# Altium schematic symbol library UCP.SchLib: 378 symbols (part 5 of 14)
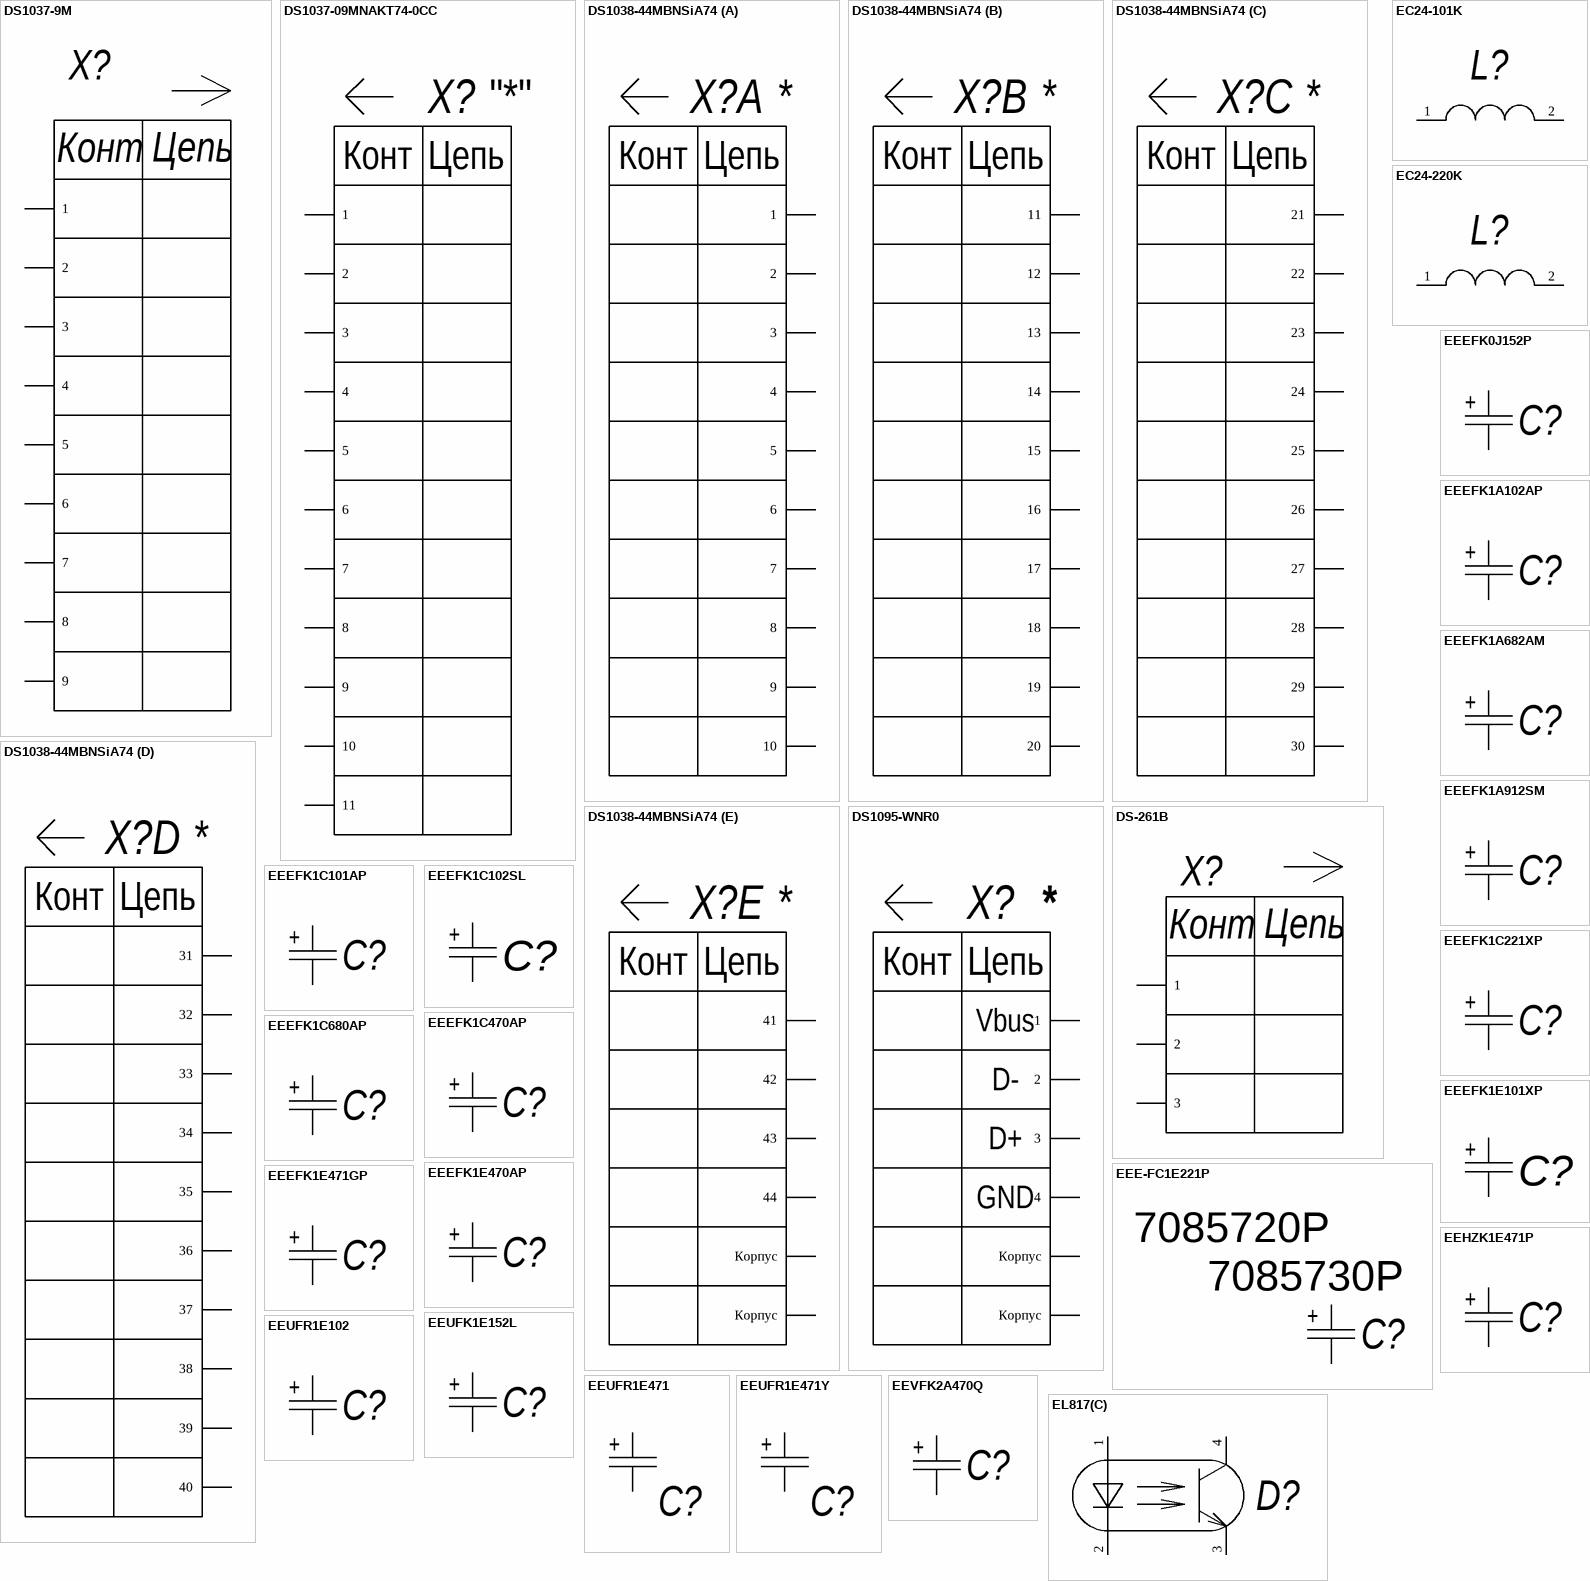
[diagram p28: symbols DS1037-9M to EL817(C)]

## EEEFK1A102AP
designator C?  (value not drawn)
Aluminium capacitor 10x10.2 1000 µF 10 V; Capacitance: 1mF; Tolerance: 20%; Ripple Current: 850mA; Voltage Rating: 10V; Impedance: 80mR; Life (Hours): 2000Hour; Leakage Current: 100uA; Dissipation Factor: 0.19%; Lead Length: 3.5mm; Value: 1mX10V; Type: Конденсатор электролитический; Supplier 1: Avnet; Supplier Part Number 1: EEE-FK1E471GP; Supplier 2: Arrow Electronics; Manufacturer 2: Panasonic; Manufacturer Part Number 2: EEE-FK1A102AP; RoHS: Yes; Category: Aluminum Electrolytic Capacitors; Stock 2: 4; Pricing 2: 1=0,75620, 500=0,34460 (USD); Mount: SMT; Case/Package: 10x10,2 (SMD-2); Number of Pins: 2; Contact Plating: Tin; Dielectric Material: Aluminium; Min Operating Temperature: -55°C; Max Operating Temperature: 105°C; Packaging: Tape and Reel; Voltage Rating (DC): 10V; Package Quantity: 500; Ripple Current (AC): 850mA; ESR (Equivalent Series Resistance): 80mR; Termination: SMD/SMT; Voltage: 10V; Series: FK; Construction: Cylindrical; Diameter: 10mm; Length: 10.2mm; Width: 10.3mm; Height: 10.2mm; Height - Seated (Max): 0.402inch; Lead Pitch: 4.6mm; Radiation Hardening: No; Lead Free: Lead Free; REACH SVHC: Unknown; RoHS Compliant: Yes; ComponentLink1URL: https://datasheet.ciiva.com/11783/0900766b80bed286-11783449.pdf?src-supplier=RSComponents; ComponentLink1Description: https://datasheet.ciiva.com/11783/0900766b80bed286-11783449.pdf?src-supplier=RSComponents; ComponentLink2URL: https://datasheet.ciiva.com/43454/58258-43454698.pdf?src-supplier=Farnell; ComponentLink2Description: https://datasheet.ciiva.com/43454/58258-43454698.pdf?src-supplier=Farnell; ComponentLink3URL: https://datasheet.ciiva.com/46388/58258-46388200.pdf?src-supplier=Element14; ComponentLink3Description: https://datasheet.ciiva.com/46388/58258-46388200.pdf?src-supplier=Element14; ComponentLink4URL: https://datasheet.ciiva.com/24024/aba0000ce120-24024165.pdf?src-supplier=Mouser; ComponentLink4Description: https://datasheet.ciiva.com/24024/aba0000ce120-24024165.pdf?src-supplier=Mouser; ComponentLink5URL: https://datasheet.ciiva.com/14602/70068081-14602683.pdf?src-supplier=Allied+Electronics; ComponentLink5Description: https://datasheet.ciiva.com/14602/70068081-14602683.pdf?src-supplier=Allied+Electronics; ComponentLink6URL: https://datasheet.ciiva.com/14607/70068081-14607445.pdf?src-supplier=Allied+Electronics; ComponentLink6Description: https://datasheet.ciiva.com/14607/70068081-14607445.pdf?src-supplier=Allied+Electronics; ComponentLink7URL: https://datasheet.ciiva.com/2985/aba0000ce119-2985368.pdf?src-supplier=Avnet; ComponentLink7Description: https://datasheet.ciiva.com/2985/aba0000ce119-2985368.pdf?src-supplier=Avnet; ComponentLink8URL: https://datasheet.ciiva.com/2985/aba0000ce119-2985367.pdf?src-supplier=Avnet; ComponentLink8Description: https://datasheet.ciiva.com/2985/aba0000ce119-2985367.pdf?src-supplier=Avnet; Case Code (Metric): 10x10.2
footprint CAPAE1030X1050L320X90N (Capacitor, Aluminum Electrolytic; 10.30 mm L X 10.30 mm W X 10.50 mm H body)
pins: 1, 2
text: +

## EEEFK1A682AM
designator C?, comment EEEFK1A682A  (value not drawn)
Aluminium capacitor 18x16.5 6800 µF 10 V; Capacitance: 6.8mF; Tolerance: 20%; Ripple Current: 2.06A; Voltage Rating: 10V; Impedance: 33mR; Life (Hours): 5000Hour; Dissipation Factor: 0.29%; Polarity: Polar; Value: 6.8mX10V; Type: Конденсатор электролитический; Supplier 1: Avnet; Supplier Part Number 1: EEE-FK1E471GP; Supplier 2: Digi-Key; Manufacturer 2: Panasonic; Manufacturer Part Number 2: EEE-FK1A682AM; RoHS: Yes; Category: Aluminum Electrolytic Capacitors; Stock 2: 400; Pricing 2: 1=2,62000, 10=2,11500, 50=1,84580 (USD); Mount: SMT; Case/Package: 18x16,5 (SMD-2); Min Operating Temperature: -55°C; Max Operating Temperature: 105°C; Packaging: Tape and Reel; Package Quantity: 125; Voltage Rating (DC): 10V; ESR (Equivalent Series Resistance): 33mR; Termination: SMD/SMT; Voltage: 10V; Series: Automotive, AEC-Q200, FK; Construction: Cylindrical; Diameter: 18mm; Length: 16.5mm; Height: 21mm; Height - Seated (Max): 0.669inch; RoHS Compliant: Yes; ComponentLink1URL: https://datasheet.ciiva.com/11783/0900766b80e4e801-11783560.pdf?src-supplier=RSComponents; ComponentLink1Description: https://datasheet.ciiva.com/11783/0900766b80e4e801-11783560.pdf?src-supplier=RSComponents; ComponentLink2URL: https://datasheet.ciiva.com/24234/aba0000ce88-470570-24234639.pdf?src-supplier=Mouser; ComponentLink2Description: https://datasheet.ciiva.com/24234/aba0000ce88-470570-24234639.pdf?src-supplier=Mouser; Case Code (Metric): 18x16.5
pins: 1, 2
text: +

## EEEFK1A912SM
designator C?  (value not drawn)
Aluminium capacitor 18x21.5 9100 µF 10 V; Manufacturer 1: Panasonic; Manufacturer Part Number 1: EEE-FK1A912SM; Capacitance: 9.1mF; Voltage Rating (DC): 10V; Value: 9.1mX10V; Type: Конденсатор электролитический; ComponentLink1URL: https://datasheet.ciiva.com/11783/0900766b80e4e801-11783560.pdf?src-supplier=RSComponents; ComponentLink1Description: https://datasheet.ciiva.com/11783/0900766b80e4e801-11783560.pdf?src-supplier=RSComponents; ComponentLink2URL: https://datasheet.ciiva.com/24234/aba0000ce88-470570-24234639.pdf?src-supplier=Mouser; ComponentLink2Description: https://datasheet.ciiva.com/24234/aba0000ce88-470570-24234639.pdf?src-supplier=Mouser; ComponentLink3URL: https://industrial.panasonic.com/cdbs/www-data/pdf/RDE0000/ABA0000C1247.pdf?src-supplier=Digi-Key; ComponentLink3Description: https://industrial.panasonic.com/cdbs/www-data/pdf/RDE0000/ABA0000C1247.pdf?src-supplier=Digi-Key; Supplier 1: Digi-Key; RoHS: No; Category: Aluminum Electrolytic Capacitors; Stock 1: 383; Pricing 1: 1=3,78000, 10=3,06100 (USD); Supplier 2: Digi-Key; Manufacturer 2: Panasonic; Manufacturer Part Number 2: EEE-FK1A912SV; Stock 2: 230; Pricing 2: 1=3,96000, 10=3,19200 (USD); Case Code (Metric): 18x21.5; Voltage Rating: 10V; Voltage: 10V; Case/Package: 18x21,5 (SMD-2); Mount: SMT
footprint CAPAE1900X2200L670X120 (Aluminum Electrolytic Capacitor, Body 19,00x19,00x21,00mm, IPC Medium Density)
pins: 1, 2
text: +

## EEEFK1C101AP
designator C?  (value not drawn)
Aluminium capacitor 6.3x6.1 100 µF x 16 V; Capacitance: 100uF; Voltage Rating (DC): 16V; Value: 100uX16V; Type: Конденсатор электролитический; Supplier 1: Avnet; Supplier Part Number 1: EEE-FK1E471GP; Case Code (Metric): 6.3x6.1; Voltage Rating: 16V; Voltage: 16V; Case/Package: 6,3x5,8 (SMD-2); Mount: SMT
footprint CAPAE660X610L260X65N (Capacitor, Aluminum Electrolytic; 6.60 mm L X 6.60 mm W X 6.10 mm H body)
pins: 1, 2
text: +

## EEEFK1C102SL
designator C?  (value not drawn)
Cap Aluminum 1000uF 16V 20% (10 X 10.2mm) Cylindrical 0.08 Ohm 850mA 2000 hr 105°C Embossed T/R; Manufacturer 1: Panasonic; Manufacturer Part Number 1: EEEFK1C102SP; Capacitance: 1mF; ESR (Equivalent Series Resistance): 80mR; Polarity: Polar; Ripple Current: 552.5mA; Life (Hours): 2000Hour; Value: 1mX16V; Type: Конденсатор электролитический; Supplier 1: RSComponents; RoHS: Yes; Category: Aluminum Electrolytic Capacitors; Stock 1: 1; Pricing 1: 10=0,79200, 100=0,57300 (USD); Mount: SMT; Case/Package: 10x10,2 (SMD-2); Min Operating Temperature: -55°C; Max Operating Temperature: 105°C; Package Quantity: 500; Packaging: Cut Tape; Voltage Rating: 16V; Ripple Current (AC): 850mA; Tolerance: 20%; Voltage Rating (DC): 16V; Diameter: 10mm; Height: 10.2mm; Height - Seated (Max): 0.413inch; REACH SVHC: Unknown; RoHS Compliant: Yes; ComponentLink1URL: http://www.farnell.com/datasheets/2052494.pdf?src-supplier=Farnell; ComponentLink1Description: http://www.farnell.com/datasheets/2052494.pdf?src-supplier=Farnell; ComponentLink2URL: http://www.farnell.com/datasheets/2813662.pdf?src-supplier=Farnell; ComponentLink2Description: http://www.farnell.com/datasheets/2813662.pdf?src-supplier=Farnell; ComponentLink3URL: https://media.digikey.com/pdf/Data%20Sheets/Panasonic%20Capacitors%20PDFs/FKS-V_Series_NPI.pdf?src-supplier=Digi-Key; ComponentLink3Description: https://media.digikey.com/pdf/Data%20Sheets/Panasonic%20Capacitors%20PDFs/FKS-V_Series_NPI.pdf?src-supplier=Digi-Key; ComponentLink4URL: http://www.farnell.com/datasheets/1996420.pdf?src-supplier=Element14; ComponentLink4Description: http://www.farnell.com/datasheets/1996420.pdf?src-supplier=Element14; ComponentLink5URL: https://industrial.panasonic.com/cdbs/www-data/pdf/RDE0000/DME0000COL90.pdf?src-supplier=Digi-Key; ComponentLink5Description: https://industrial.panasonic.com/cdbs/www-data/pdf/RDE0000/DME0000COL90.pdf?src-supplier=Digi-Key; Case Code (Metric): 10x10.2; Voltage: 16V
footprint CAPAE1030X1050L320X90N (Capacitor, Aluminum Electrolytic; 10.30 mm L X 10.30 mm W X 10.50 mm H body)
pins: 1, 2
text: +

## EEEFK1C221XP
designator C?  (value not drawn)
Aluminium capacitor 6.3x7.7 220 µF x 16 V; Capacitance: 220uF; Voltage Rating (DC): 16V; Value: 220uX16V; Type: Конденсатор электролитический; Case Code (Metric): 6.3x7.7; Voltage Rating: 16V; Voltage: 16V; Case/Package: 6,3x7,7 (SMD-2); Mount: SMT; Supplier 1: Avnet; Supplier Part Number 1: 23T0845
footprint CAPAE660X610L260X65N (Capacitor, Aluminum Electrolytic; 6.60 mm L X 6.60 mm W X 6.10 mm H body)
pins: 1, 2
text: +

## EEEFK1C470AP
designator C?  (value not drawn)
Aluminium capacitor 6.3x6.1 47 µF x 16 V; Capacitance: 47uF; Voltage Rating (DC): 16V; Value: 47uX16V; Type: Конденсатор электролитический; Supplier 1: Avnet; Supplier Part Number 1: EEE-FK1E471GP; Case Code (Metric): 6.3x6.1; Voltage Rating: 16V; Voltage: 16V; Case/Package: 6,3x5,8 (SMD-2); Mount: SMT
footprint CAPAE660X610L260X65N (Capacitor, Aluminum Electrolytic; 6.60 mm L X 6.60 mm W X 6.10 mm H body)
pins: 1, 2
text: +

## EEEFK1C680AP
designator C?  (value not drawn)
Aluminium capacitor 6.3x6.1 68 µF x 16 V; Capacitance: 68uF; Voltage Rating (DC): 16V; Value: 68uX16V; Type: Конденсатор электролитический; Supplier 1: Avnet; Supplier Part Number 1: EEE-FK1E471GP; Case Code (Metric): 6.3x6.1; Voltage Rating: 16V; Voltage: 16V; Case/Package: 6,3x5,8 (SMD-2); Mount: SMT
footprint CAPAE660X610L260X65N (Capacitor, Aluminum Electrolytic; 6.60 mm L X 6.60 mm W X 6.10 mm H body)
pins: 1, 2
text: +

## EEEFK1E101XP
designator C?  (value not drawn)
Capacitor; Aluminum Electrolytic; Ecap 100uF 25V D8 Case FK SMT; Manufacturer 1: Panasonic; Manufacturer Part Number 1: EEE-FK1E101XP; Tolerance: 20%; Ripple Current: 280mA; Life (Hours): 2000Hour; ESR (Equivalent Series Resistance): 340mR; Polarity: Polar; Leakage Current: 25uA; Lead Diameter: 0.65mm; Value: 100uX25V; Type: Конденсатор электролитический; Supplier 1: RSComponents; Supplier Part Number 1: 7083428; RoHS: Yes; Category: Aluminum Electrolytic Capacitors; Stock 1: 1; Pricing 1: 25=0,58000, 100=0,53900, 250=0,50900, 500=0,46900, 1000=0,43200 (USD); Mount: SMT; Case/Package: 6,3x5,8 (SMD-2); Number of Pins: 8; Contact Plating: Tin; Min Operating Temperature: -55°C; Max Operating Temperature: 105°C; Capacitance: 100uF; Voltage Rating (DC): 25V; Packaging: Tape and Reel; Voltage Rating: 25V; Ripple Current (AC): 280mA; Impedance: 340mR; Package Quantity: 1; Termination: SMD/SMT; Voltage: 25V; Series: FK; Construction: Cylindrical; Diameter: 6.3mm; Length: 7.7mm; Width: 7.8mm; Height: 7.7mm; Lead Pitch: 1.8mm; Height - Seated (Max): 0.315inch; Radiation Hardening: No; REACH SVHC: No SVHC; Lead Free: Lead Free; RoHS Compliant: Yes; ComponentLink1URL: https://datasheet.ciiva.com/11777/0900766b80e4e8b0-11777232.pdf?src-supplier=RSComponents; ComponentLink1Description: https://datasheet.ciiva.com/11777/0900766b80e4e8b0-11777232.pdf?src-supplier=RSComponents; ComponentLink2URL: https://datasheet.ciiva.com/46386/1676921-46386184.pdf?src-supplier=Element14; ComponentLink2Description: https://datasheet.ciiva.com/46386/1676921-46386184.pdf?src-supplier=Element14; ComponentLink3URL: https://datasheet.ciiva.com/46376/1676921-46376486.pdf?src-supplier=Element14; ComponentLink3Description: https://datasheet.ciiva.com/46376/1676921-46376486.pdf?src-supplier=Element14; ComponentLink4URL: https://datasheet.ciiva.com/43463/58258-43463513.pdf?src-supplier=Farnell; ComponentLink4Description: https://datasheet.ciiva.com/43463/58258-43463513.pdf?src-supplier=Farnell; ComponentLink5URL: https://datasheet.ciiva.com/46386/58258-46386183.pdf?src-supplier=Element14; ComponentLink5Description: https://datasheet.ciiva.com/46386/58258-46386183.pdf?src-supplier=Element14; ComponentLink6URL: https://datasheet.ciiva.com/28678/731857-28678871.pdf?src-supplier=Element14; ComponentLink6Description: https://datasheet.ciiva.com/28678/731857-28678871.pdf?src-supplier=Element14; ComponentLink7URL: https://datasheet.ciiva.com/24023/aba0000ce120-24023434.pdf?src-supplier=Mouser; ComponentLink7Description: https://datasheet.ciiva.com/24023/aba0000ce120-24023434.pdf?src-supplier=Mouser; ComponentLink8URL: https://datasheet.ciiva.com/14594/70258115-14594399.pdf?src-supplier=Allied+Electronics; ComponentLink8Description: https://datasheet.ciiva.com/14594/70258115-14594399.pdf?src-supplier=Allied+Electronics; ComponentLink9URL: https://datasheet.ciiva.com/2983/aba0000ce120-2983950.pdf?src-supplier=Avnet; ComponentLink9Description: https://datasheet.ciiva.com/2983/aba0000ce120-2983950.pdf?src-supplier=Avnet; ComponentLink10URL: https://datasheet.ciiva.com/16449/aba0000ce120-16449109.pdf?src-supplier=Future+Electronics; ComponentLink10Description: https://datasheet.ciiva.com/16449/aba0000ce120-16449109.pdf?src-supplier=Future+Electronics; ComponentLink11URL: https://datasheet.ciiva.com/2983/aba0000ce120-2983949.pdf?src-supplier=Avnet; ComponentLink11Description: https://datasheet.ciiva.com/2983/aba0000ce120-2983949.pdf?src-supplier=Avnet; Case Code (Metric): 6.3x6.1
footprint CAPAE660X610L260X65N (Capacitor, Aluminum Electrolytic; 6.60 mm L X 6.60 mm W X 6.10 mm H body)
pins: 1, 2
text: +

## EEEFK1E470AP
designator C?  (value not drawn)
Aluminium capacitor 6.3x6.1 47 µF x 25 V; Manufacturer 1: Panasonic; Manufacturer Part Number 1: EEE-FK1E470AP; Description 1: Cap Aluminum 47uF 25V 20% (6.3 X 5.8mm) SMD 240mA 2000 hr 105°C T/R; Capacitance: 47uF; Tolerance: 20%; Ripple Current: 240mA; Voltage Rating: 25V; Impedance: 360mR; Polarity: Polar; Life (Hours): 2000Hour; Leakage Current: 11.7uA; Lead Length: 2.6mm; Value: 47uX25V; Type: Конденсатор электролитический; Supplier 1: Arrow Electronics; Supplier Part Number 1: EEE-FK1E470AP; RoHS: Yes; Category: Aluminum Electrolytic Capacitors; Stock 1: 2; Pricing 1: 1=0,36020, 1000=0,14660 (USD); Mount: SMT; Case/Package: 6,3x5,8 (SMD-2); Number of Pins: 2; Contact Plating: Tin; Dielectric Material: Aluminium; Min Operating Temperature: -55°C; Max Operating Temperature: 105°C; Packaging: Tape and Reel; Package Quantity: 1000; Ripple Current (AC): 240mA; Voltage Rating (DC): 25V; ESR (Equivalent Series Resistance): 360mR; Termination: SMD/SMT; Voltage: 25V; Series: FK; Construction: Cylindrical; Diameter: 6.3mm; Length: 5.8mm; Width: 6.6mm; Height: 5.8mm; Height - Seated (Max): 0.24inch; Lead Pitch: 1.8mm; Radiation Hardening: No; REACH SVHC: Unknown; Lead Free: Lead Free; RoHS Compliant: Yes; ComponentLink1URL: https://datasheet.ciiva.com/11783/0900766b80bed286-11783530.pdf?src-supplier=RSComponents; ComponentLink1Description: https://datasheet.ciiva.com/11783/0900766b80bed286-11783530.pdf?src-supplier=RSComponents; ComponentLink2URL: https://datasheet.ciiva.com/46388/58258-46388550.pdf?src-supplier=Element14; ComponentLink2Description: https://datasheet.ciiva.com/46388/58258-46388550.pdf?src-supplier=Element14; ComponentLink3URL: https://datasheet.ciiva.com/5949/58258-5949726.pdf?src-supplier=Farnell; ComponentLink3Description: https://datasheet.ciiva.com/5949/58258-5949726.pdf?src-supplier=Farnell; ComponentLink4URL: https://datasheet.ciiva.com/48524/eeefk-high-temp-eng-tds-48524060.pdf?src-supplier=Distrelec; ComponentLink4Description: https://datasheet.ciiva.com/48524/eeefk-high-temp-eng-tds-48524060.pdf?src-supplier=Distrelec; ComponentLink5URL: https://datasheet.ciiva.com/28678/58258-28678894.pdf?src-supplier=Element14; ComponentLink5Description: https://datasheet.ciiva.com/28678/58258-28678894.pdf?src-supplier=Element14; ComponentLink6URL: https://datasheet.ciiva.com/14595/70068081-14595769.pdf?src-supplier=Allied+Electronics; ComponentLink6Description: https://datasheet.ciiva.com/14595/70068081-14595769.pdf?src-supplier=Allied+Electronics; ComponentLink7URL: https://datasheet.ciiva.com/2985/aba0000ce119-2985429.pdf?src-supplier=Avnet; ComponentLink7Description: https://datasheet.ciiva.com/2985/aba0000ce119-2985429.pdf?src-supplier=Avnet; ComponentLink8URL: https://datasheet.ciiva.com/2985/aba0000ce119-2985428.pdf?src-supplier=Avnet; ComponentLink8Description: https://datasheet.ciiva.com/2985/aba0000ce119-2985428.pdf?src-supplier=Avnet; ComponentLink9URL: https://datasheet.ciiva.com/30206/48aba0000ce119-30206286.pdf?src-supplier=Onlinecomponents.com; ComponentLink9Description: https://datasheet.ciiva.com/30206/48aba0000ce119-30206286.pdf?src-supplier=Onlinecomponents.com; ComponentLink10URL: https://datasheet.ciiva.com/17356/aba0000ce119-17356191.pdf?src-supplier=Avnet+Europe; ComponentLink10Description: https://datasheet.ciiva.com/17356/aba0000ce119-17356191.pdf?src-supplier=Avnet+Europe; Case Code (Metric): 6.3x6.1
footprint CAPAE660X610L260X65N (Capacitor, Aluminum Electrolytic; 6.60 mm L X 6.60 mm W X 6.10 mm H body)
pins: 1, 2
text: +

## EEEFK1E471GP
designator C?  (value not drawn)
Aluminium capacitor 10x10.2 470 µF; Capacitance: 470uF; Voltage Rating: 25V; Tolerance: 20%; Ripple Current: 850mA; Polarity: Polar; Life (Hours): 5000Hour; Leakage Current: 3uA; Dissipation Factor: 0.14%; Impedance: 80mR; Value: 470uX25V; Type: Конденсатор электролитический; Supplier 1: Avnet; Supplier Part Number 1: EEE-FK1E471GP; Supplier 2: RSComponents; Supplier Part Number 2: 7271026P; Manufacturer 2: Panasonic; Manufacturer Part Number 2: EEE-FK1E471GP; RoHS: Yes; Category: Aluminum Electrolytic Capacitors; Stock 2: 1; Pricing 2: 5=1,03500, 50=0,60700, 250=0,53100, 500=0,41500 (USD); Mount: SMT; Case/Package: 10x10,2 (SMD-2); Contact Plating: Tin; Min Operating Temperature: -55°C; Max Operating Temperature: 125°C; Packaging: Tape and Reel; Package Quantity: 500; Ripple Current (AC): 850mA; Voltage Rating (DC): 25V; Termination: SMD/SMT; Voltage: 25V; Series: FK; Construction: Cylindrical; ESR (Equivalent Series Resistance): 80mR; Diameter: 10mm; Length: 10.2mm; Width: 12mm; Height: 10.2mm; Height - Seated (Max): 0.413inch; Radiation Hardening: No; REACH SVHC: No SVHC; Lead Free: Lead Free; RoHS Compliant: Yes; ComponentLink1URL: https://datasheet.ciiva.com/11781/0900766b80e4e8b0-11781152.pdf?src-supplier=RSComponents; ComponentLink1Description: https://datasheet.ciiva.com/11781/0900766b80e4e8b0-11781152.pdf?src-supplier=RSComponents; ComponentLink2URL: https://datasheet.ciiva.com/46378/1676921-46378360.pdf?src-supplier=Element14; ComponentLink2Description: https://datasheet.ciiva.com/46378/1676921-46378360.pdf?src-supplier=Element14; ComponentLink3URL: https://datasheet.ciiva.com/31418/1676921-31418314.pdf?src-supplier=Farnell; ComponentLink3Description: https://datasheet.ciiva.com/31418/1676921-31418314.pdf?src-supplier=Farnell; ComponentLink4URL: https://datasheet.ciiva.com/24072/aba0000ce120-24072111.pdf?src-supplier=Mouser; ComponentLink4Description: https://datasheet.ciiva.com/24072/aba0000ce120-24072111.pdf?src-supplier=Mouser; ComponentLink5URL: https://datasheet.ciiva.com/14603/70258115-14603257.pdf?src-supplier=Allied+Electronics; ComponentLink5Description: https://datasheet.ciiva.com/14603/70258115-14603257.pdf?src-supplier=Allied+Electronics; ComponentLink6URL: https://datasheet.ciiva.com/14604/70258115-14604159.pdf?src-supplier=Allied+Electronics; ComponentLink6Description: https://datasheet.ciiva.com/14604/70258115-14604159.pdf?src-supplier=Allied+Electronics; ComponentLink7URL: https://datasheet.ciiva.com/2983/aba0000ce120-2983959.pdf?src-supplier=Avnet; ComponentLink7Description: https://datasheet.ciiva.com/2983/aba0000ce120-2983959.pdf?src-supplier=Avnet; ComponentLink8URL: https://datasheet.ciiva.com/16432/aba0000ce120-16432908.pdf?src-supplier=Future+Electronics; ComponentLink8Description: https://datasheet.ciiva.com/16432/aba0000ce120-16432908.pdf?src-supplier=Future+Electronics; ComponentLink9URL: https://datasheet.ciiva.com/15166/getdatasheetpartid-191535-15166316.pdf?src-supplier=Verical; ComponentLink9Description: https://datasheet.ciiva.com/15166/getdatasheetpartid-191535-15166316.pdf?src-supplier=Verical; ComponentLink10URL: https://datasheet.ciiva.com/2985/aba0000ce120-2985432.pdf?src-supplier=Avnet; ComponentLink10Description: https://datasheet.ciiva.com/2985/aba0000ce120-2985432.pdf?src-supplier=Avnet; ComponentLink11URL: https://datasheet.ciiva.com/30249/aba0000ce120-30249069.pdf?src-supplier=Onlinecomponents.com; ComponentLink11Description: https://datasheet.ciiva.com/30249/aba0000ce120-30249069.pdf?src-supplier=Onlinecomponents.com; Case Code (Metric): 10x10.2
footprint CAPAE1030X1050L320X90N (Capacitor, Aluminum Electrolytic; 10.30 mm L X 10.30 mm W X 10.50 mm H body)
pins: 1, 2
text: +

## EEHZK1E471P
designator C?  (value not drawn)
Aluminium capacitor 10x10.2 470 µF 25V Irms 2800 mA; Manufacturer 1: Panasonic; Value: 470uX25V; Type: Конденсатор электролитический; Capacitance: 470uF; Tolerance: 20%; ESR (Equivalent Series Resistance): 20mR; Life (Hours): 4000Hour; Mount: SMT; Case/Package: 10x10,2 (SMD-2); Termination: SMD/SMT; Case Code (Metric): 10x10.2; Voltage: 25V; Voltage Rating (DC): 25V; Voltage Rating: 25V; Supplier 1: Rs; Supplier Part Number 1: 1311958P; Manufacturer Part Number 1: EEHZK1E471P; RoHS 1: Yes; Category: Polymer Capacitors; Stock 1: 890; Pricing 1: 25=2,234, 50=2,07, 125=1,928, 250=1,738 (GBP); Min Operating Temperature: -55°C; Max Operating Temperature: 125°C; Packaging: Cut Tape; Resistor Type: Hybrid; Ratings: AEC-Q200; RoHS Compliant: Yes; ComponentLink1URL: http://industrial.panasonic.com/cdbs/www-data/pdf/RDD0000/ABA0000C1229.pdf?src-supplier=Farnell; ComponentLink1Description: http://industrial.panasonic.com/cdbs/www-data/pdf/RDD0000/ABA0000C1229.pdf?src-supplier=Farnell; ComponentLink2URL: https://industrial.panasonic.com/cdbs/www-data/pdf/RDD0000/DMD0000COL81.pdf?src-supplier=Digi-Key; ComponentLink2Description: https://industrial.panasonic.com/cdbs/www-data/pdf/RDD0000/DMD0000COL81.pdf?src-supplier=Digi-Key; ComponentLink3URL: https://industrial.panasonic.com/cdbs/www-data/pdf/RDD0000/ABA0000C1229.pdf?src-supplier=Digi-Key; ComponentLink3Description: https://industrial.panasonic.com/cdbs/www-data/pdf/RDD0000/ABA0000C1229.pdf?src-supplier=Digi-Key
footprint CAPAE1030X1050L320X90N (Capacitor, Aluminum Electrolytic; 10.30 mm L X 10.30 mm W X 10.50 mm H body)
pins: 1, 2
text: +

## EEUFK1E152L
designator C?  (value not drawn)
Cap Aluminum 1500uF 25V 20% (10 X 30mm) Radial 5mm 2140mA 4000 hr 105C Bulk; Manufacturer 1: Panasonic; Dielectric Material: Aluminium; Capacitance: 1.5mF; Ripple Current: 2.14A; Life (Hours): 4000Hour; Dissipation Factor: 0.14%; Lead/Base Style: Straight; Lead Diameter: 0.6mm; Value: 1.5mX25V; Type: Конденсатор электролитический; Supplier 1: Digi-Key; Manufacturer Part Number 1: EEUFK1E152L; RoHS: Yes; Category: Aluminum Electrolytic Capacitors; Stock 1: 223; Pricing 1: 1=1,47000, 10=1,15800, 50=1,00380, 100=0,86860, 500=0,65630, 1000=0,57908, 2500=0,54048, 5000=0,52117 (USD); Mount: THT; Case/Package: DIP-5; Min Operating Temperature: -55°C; Max Operating Temperature: 105°C; Tolerance: 20%; Termination: Radial; Voltage Rating: 25V; Packaging: Bulk; Voltage: 25V; Voltage Rating (DC): 25V; Package Quantity: 100; Series: FK; Construction: RADIAL; Diameter: 10mm; Length: 30mm; Height: 30mm; Lead Pitch: 5mm; Radiation Hardening: No; REACH SVHC: No SVHC; RoHS Compliant: Yes; ComponentLink1URL: https://datasheet.ciiva.com/11780/0900766b80bee888-11780167.pdf?src-supplier=RSComponents; ComponentLink1Description: https://datasheet.ciiva.com/11780/0900766b80bee888-11780167.pdf?src-supplier=RSComponents; ComponentLink2URL: https://datasheet.ciiva.com/6060/425742-6060252.pdf?src-supplier=Farnell; ComponentLink2Description: https://datasheet.ciiva.com/6060/425742-6060252.pdf?src-supplier=Farnell; ComponentLink3URL: https://datasheet.ciiva.com/7903/425742-7903046.pdf?src-supplier=Element14; ComponentLink3Description: https://datasheet.ciiva.com/7903/425742-7903046.pdf?src-supplier=Element14; ComponentLink4URL: https://datasheet.ciiva.com/11677/aba0000ce89-11677785.pdf?src-supplier=Avnet; ComponentLink4Description: https://datasheet.ciiva.com/11677/aba0000ce89-11677785.pdf?src-supplier=Avnet; ComponentLink5URL: https://datasheet.ciiva.com/17531/aba0000ce89-17531930.pdf?src-supplier=Avnet+Europe; ComponentLink5Description: https://datasheet.ciiva.com/17531/aba0000ce89-17531930.pdf?src-supplier=Avnet+Europe; Supplier Part Number 1: P124293-ND; Case Code (Metric): 10x30
footprint CAPPRD500W62D1050H3000_HU (Capacitor, Polarized, Radial (Electrolytic); 5.00 mm C X 10.00 mm Dia X 30.00 mm H body)
footprint CAPPRD500W62D1050H3000_HD (Capacitor, Polarized, Radial (Electrolytic); 5.00 mm C X 10.00 mm Dia X 30.00 mm H body)
pins: 1, 2
text: +

## EEUFR1E102
designator C?  (value not drawn)
Aluminium capacitor 10x20 1000 µF 25V; Capacitance: 1mF; Value: 1mX25; Type: Конденсатор электролитический; Supplier 1: Digi-Key; Supplier Part Number 1: P14424-ND; Case Code (Metric): 10x20; Voltage Rating (DC): 25V; Voltage Rating: 25V; Voltage: 25V; Case/Package: DIP-4; Mount: THT
footprint CAPPRD500W60D1050H2200 (Capacitor, Polarized, Radial (Electrolytic); 5.00 mm C X 10.50 mm Dia X 22.00 mm H body)
footprint CAPPRD500W60D1050H1100 _HU (Capacitor, Polarized, Radial (Electrolytic); 5.00 mm C X 10.50 mm Dia X 22.00 mm H body)
footprint CAPPRD500W60D1050H1100 _HD (Capacitor, Polarized, Radial (Electrolytic); 5.00 mm C X 10.50 mm Dia X 22.00 mm H body)
pins: 1, 2
text: +

## EEUFR1E471
designator C?  (value not drawn)
Aluminium capacitor 10x12,5 470 µF 25V; Capacitance: 470uF; Value: 470uX25V; Type: Конденсатор электролитический; Supplier 1: Digi-Key; Supplier Part Number 1: P14419-ND; Case Code (Metric): 10x12.5; Voltage Rating (DC): 25V; Voltage Rating: 25V; Voltage: 25V; Case/Package: DIP-3; Mount: THT
footprint CAPPRD500W60D1050H1400 (Capacitor, Polarized, Radial (Electrolytic); 5.00 mm C X 10.50 mm Dia X 14.00 mm H body)
pins: 1, 2
text: +

## EEUFR1E471Y
designator C?  (value not drawn)
Aluminium capacitor 10x15 470 µF 25V; Capacitance: 470uF; Value: 470uX25V; Type: Конденсатор электролитический; Supplier 1: Newark; Supplier Part Number 1: 49W7427; Case Code (Metric): 10x15; Voltage Rating (DC): 25V; Voltage Rating: 25V; Voltage: 25V; Case/Package: DIP-2; Mount: THT
footprint CAPPRD350W60D850H1650 (Capacitor, Polarized, Radial (Electrolytic); 3.50 mm C X 8.50 mm Dia X 16.50 mm H body)
footprint CAPPRD350W60D850H910_HU (Capacitor, Polarized, Radial (Electrolytic); 3.50 mm C X 8.50 mm Dia X 16.50 mm H body)
footprint CAPPRD350W60D850H910_HD (Capacitor, Polarized, Radial (Electrolytic); 3.50 mm C X 8.50 mm Dia X 16.50 mm H body)
pins: 1, 2
text: +

## EEVFK2A470Q
designator C?  (value not drawn)
Cap Aluminum 47uF 100V 20% (12.5 X 13.5mm) SMD 0.32 Ohm 500mA 2000h 105°C T/R; Manufacturer 1: Panasonic; Dielectric Material: Aluminium; Impedance: 320mR; Life (Hours): 5000Hour; Leakage Current: 3uA; Value: 47uX100V; Type: Конденсатор электролитический; Manufacturer 2: Panasonic; Manufacturer Part Number 2: EEVFK2A470Q; RoHS: Yes; Category: Aluminum Electrolytic Capacitors; Stock 2: 406; Pricing 2: 1=1,32000, 10=1,03800, 50=0,90000, 100=0,77880 (USD); Mount: SMT; Case/Package: 12,5x13,5 (SMD-2); Number of Pins: 2; Contact Plating: Tin; Min Operating Temperature: -55°C; Max Operating Temperature: 105°C; Capacitance: 47uF; Voltage Rating: 100V; Tolerance: 20%; Ripple Current: 500mA; Packaging: Tape and Reel; Package Quantity: 1; Ripple Current (AC): 500mA; Voltage Rating (DC): 100V; ESR (Equivalent Series Resistance): 320mR; Termination: SMD/SMT; Voltage: 100V; Series: FK; Construction: Cylindrical; Diameter: 12.5mm; Length: 14mm; Width: 900um; Height: 13.5mm; Height - Seated (Max): 0.531inch; Radiation Hardening: No; REACH SVHC: No SVHC; Lead Free: Lead Free; RoHS Compliant: Yes; ComponentLink1URL: https://datasheet.ciiva.com/11778/0900766b806bc526-11778295.pdf?src-supplier=RSComponents; ComponentLink1Description: https://datasheet.ciiva.com/11778/0900766b806bc526-11778295.pdf?src-supplier=RSComponents; ComponentLink2URL: https://datasheet.ciiva.com/14608/70258115-14608637.pdf?src-supplier=Allied+Electronics; ComponentLink2Description: https://datasheet.ciiva.com/14608/70258115-14608637.pdf?src-supplier=Allied+Electronics; ComponentLink3URL: https://datasheet.ciiva.com/14598/70258115-14598518.pdf?src-supplier=Allied+Electronics; ComponentLink3Description: https://datasheet.ciiva.com/14598/70258115-14598518.pdf?src-supplier=Allied+Electronics; ComponentLink4URL: https://datasheet.ciiva.com/43485/1676921-43485533.pdf?src-supplier=Farnell; ComponentLink4Description: https://datasheet.ciiva.com/43485/1676921-43485533.pdf?src-supplier=Farnell; ComponentLink5URL: https://datasheet.ciiva.com/5950/1676921-5950013.pdf?src-supplier=Farnell; ComponentLink5Description: https://datasheet.ciiva.com/5950/1676921-5950013.pdf?src-supplier=Farnell; ComponentLink6URL: https://datasheet.ciiva.com/36855/1676921-36855237.pdf?src-supplier=Element14; ComponentLink6Description: https://datasheet.ciiva.com/36855/1676921-36855237.pdf?src-supplier=Element14; ComponentLink7URL: https://datasheet.ciiva.com/2984/aba0000ce120-2984092.pdf?src-supplier=Avnet; ComponentLink7Description: https://datasheet.ciiva.com/2984/aba0000ce120-2984092.pdf?src-supplier=Avnet; ComponentLink8URL: https://datasheet.ciiva.com/16205/aba0000ce120-16205373.pdf?src-supplier=Future+Electronics; ComponentLink8Description: https://datasheet.ciiva.com/16205/aba0000ce120-16205373.pdf?src-supplier=Future+Electronics; ComponentLink9URL: https://datasheet.ciiva.com/11178/aba0000ce120-11178232.pdf?src-supplier=Avnet; ComponentLink9Description: https://datasheet.ciiva.com/11178/aba0000ce120-11178232.pdf?src-supplier=Avnet; ComponentLink10URL: https://datasheet.ciiva.com/30223/eev-fkseries-30223615.pdf?src-supplier=Onlinecomponents.com; ComponentLink10Description: https://datasheet.ciiva.com/30223/eev-fkseries-30223615.pdf?src-supplier=Onlinecomponents.com; ComponentLink11URL: https://datasheet.ciiva.com/17534/aba0000ce120-17534298.pdf?src-supplier=Avnet+Europe; ComponentLink11Description: https://datasheet.ciiva.com/17534/aba0000ce120-17534298.pdf?src-supplier=Avnet+Europe; Supplier 1: Digi-Key; Manufacturer Part Number 1: EEVFK2A470Q; Stock 1: 406; Pricing 1: 1=1,32000, 10=1,03800, 50=0,90000, 100=0,77880 (USD); Case Code (Metric): 12.5x13.5
footprint CAPAE1350X1400L470X90 (Aluminum Electrolytic Capacitor, Body 13,50x13,50x14,00mm, IPC Medium Density)
pins: 1, 2
text: +

## EL817(C)
designator D?  (value not drawn)
4PIN PHOTOTRANSISTOR PHOTOCOUPLER; Type: Оптопара; Value: 817; Supplier 1: Arrow Electronics; Supplier Part Number 1: EL817(C)-V; Case/Package: DIP-4; Mount: THT
footprint DIP762W50P254L488H480Q4 (DIP, 7.62 mm lead span, 2.54 mm pitch; 4 pin, 4.88 mm L X 6.80 mm W X 4.80 mm H body)
pins: 1 Anode, 2 Cathode, 3 Emitter, 4 Collector

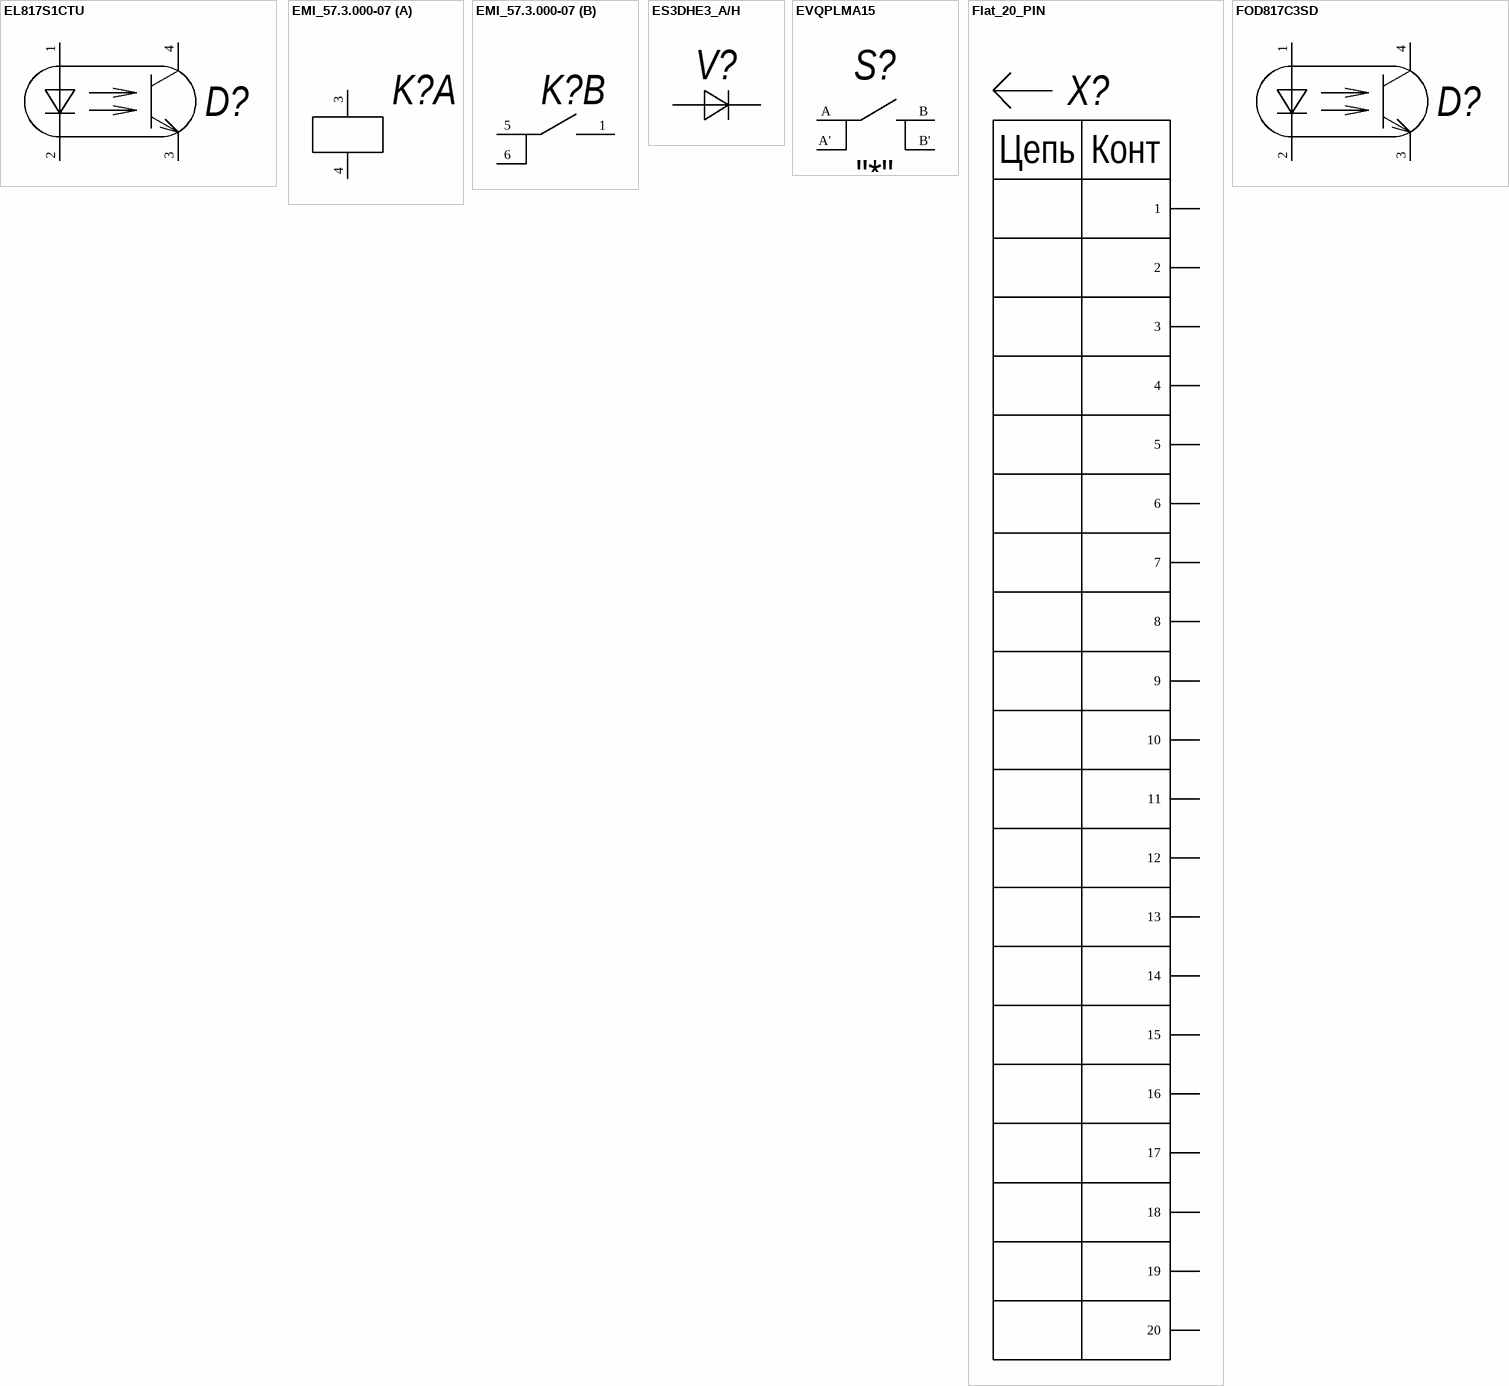
[diagram p12: symbols EL817S1CTU to FOD817С3SD]

## EL817S1CTU
designator D?  (value not drawn)
4PIN PHOTOTRANSISTOR PHOTOCOUPLER; Type: Оптопара; Value: 817; Supplier 1: Digi-Key; Supplier 2: Arrow Electronics; Supplier Part Number 1: EL817(S1)(C)(TU)-VG-ND; Supplier Part Number 2: EL817(S1)(D)(TU)-V; Case/Package: SMD-4; Mount: SMT
footprint DIPSMD762W50P254L510H400Q4 (DIP, 7.62 mm lead span, 2.54 mm pitch; 4 pin, 5.10 mm L X 7.00 mm W X 4.00 mm H body)
footprint DIPSMD762W50P254L510H390Q4 (DIP, 7.62 mm lead span, 2.54 mm pitch; 4 pin, 5.10 mm L X 6.50 mm W X 3.90 mm H body)
pins: 1 Anode, 2 Cathode, 3 Emitter, 4 Collector

## EMI_57.3.000-07
designator K?, comment ЭМИ 57.3.000-07  (value not drawn)
Реле бескорпусное, 12В, 30А, 1 группа на замыкание (Нормально разомкнутые контакты); Value: ЭМИ57; Case/Package: DIP-5; Mount: THT; Type: Реле
footprint EMI_57.3.000_SPTS (Бескорпусное реле серии ЭМИ (Одна Замыкающая группа))
part A pins: 3 "Вывод обмотки", 4 "Вывод обмотки"
part B pins: 1 "Назначение вывода", 5 "Назначение вывода", 6 "Назначение вывода"

## ES3DHE3_A/H
designator V?  (value not drawn)
Diode Switching 200V 3A Automotive 2-Pin SMC T/R; Manufacturer 1: Vishay; Reverse Recovery Time: 30ns; Peak Non-Repetitive Surge Current: 100A; Element Configuration: Single; Forward Voltage: 900mV; Value: S3; Supplier 1: Digi-Key; Supplier 2: Digi-Key; Supplier 3: Mouser; Supplier Part Number 1: ES3DHE3_A/HGICT-ND; Supplier Part Number 2: ES3DHE3_A/HGIDKR-ND; Supplier Part Number 3: 78-ES3DHE3_A/H; Manufacturer Part Number 1: ES3DHE3_A/H; RoHS: Yes; Category: Rectifier Diodes; Stock 1: 45; Pricing 1: 1=0,76000, 10=0,67200, 100=0,51490 (USD); Mount: SMT; Case/Package: SMC(DO-214AC); Number of Pins: 2; Min Operating Temperature: -55°C; Max Operating Temperature: 150°C; Max Repetitive Reverse Voltage (Vrrm): 200V; Packaging: Tape and Reel; Average Rectified Current: 3A; Max Reverse Voltage (DC): 200V; Radiation Hardening: No; RoHS Compliant: Yes; ComponentLink1URL: http://www.mouser.com/ds/2/427/es3-596379.pdf?src-supplier=Mouser; ComponentLink1Description: http://www.mouser.com/ds/2/427/es3-596379.pdf?src-supplier=Mouser; ComponentLink2URL: http://components.arrow.com/part/dataview/0323_07049196?src-supplier=Arrow+Europe; ComponentLink2Description: http://components.arrow.com/part/dataview/0323_07049196?src-supplier=Arrow+Europe; ComponentLink3URL: http://www.vishay.com/docs/88589/es3.pdf?src-supplier=Digi-Key; ComponentLink3Description: http://www.vishay.com/docs/88589/es3.pdf?src-supplier=Digi-Key; ComponentLink4URL: http://www.vishay.com/docs/88589/es3a.pdf?src-supplier=Avnet+Europe; ComponentLink4Description: http://www.vishay.com/docs/88589/es3a.pdf?src-supplier=Avnet+Europe; ComponentLink5URL: http://www.vishay.com/docs/88589/es3a.pdf?src-supplier=Avnet; ComponentLink5Description: http://www.vishay.com/docs/88589/es3a.pdf?src-supplier=Avnet; Type: Диод
footprint DIOM794X590X262L114X305M (Diode, Molded Body; 6.855 mm L X 5.905 mm W X 2.62 mm H body)
pins: A, C

## EVQPLMA15
designator S?  Marck-2: "*"  (hidden comment: EVQPLMA15)
Alcoswitch Tactile FSM JSM, Tactile Switches, Round Actuator Style, Operating Function Yes, Copper Alloy, Silver, Low Profile 12.5 mm; Supplier 1: Newark; Supplier Part Number 1: 75AC5329; Marck-1: *; Case/Package: SMD-6; Mount: SMT; Type: Кнопка; Value: EVQPLMA15
footprint EVQPLMA15
pins: A 1 "Назначение вывода", A' 2 "Назначение вывода", B 3 "Назначение вывода", B' 4 "Назначение вывода"

## Flat_20_PIN
designator X?  (no BOM)
Value: 0; Case/Package: SMD-20; Mount: SMT; Type: 0
footprint Flat_20_pin
pins: 1, 2, 3, 4, 5, 6, 7, 8, 9, 10, 11, 12, 13, 14, 15, 16, 17, 18, 19, 20
text: Цепь; Конт

## FOD817С3SD
designator D?  (value not drawn)
4PIN PHOTOTRANSISTOR PHOTOCOUPLER; Type: Оптопара; Value: 817; Case/Package: SMD-4; Mount: SMT; Supplier 1: Avnet; Supplier Part Number 1: FOD8173SD
footprint DIPSMD762W50P254L510H400Q4 (DIP, 7.62 mm lead span, 2.54 mm pitch; 4 pin, 5.10 mm L X 7.00 mm W X 4.00 mm H body)
footprint DIPSMD762W50P254L510H390Q4 (DIP, 7.62 mm lead span, 2.54 mm pitch; 4 pin, 5.10 mm L X 6.50 mm W X 3.90 mm H body)
pins: 1 Anode, 2 Cathode, 3 Emitter, 4 Collector

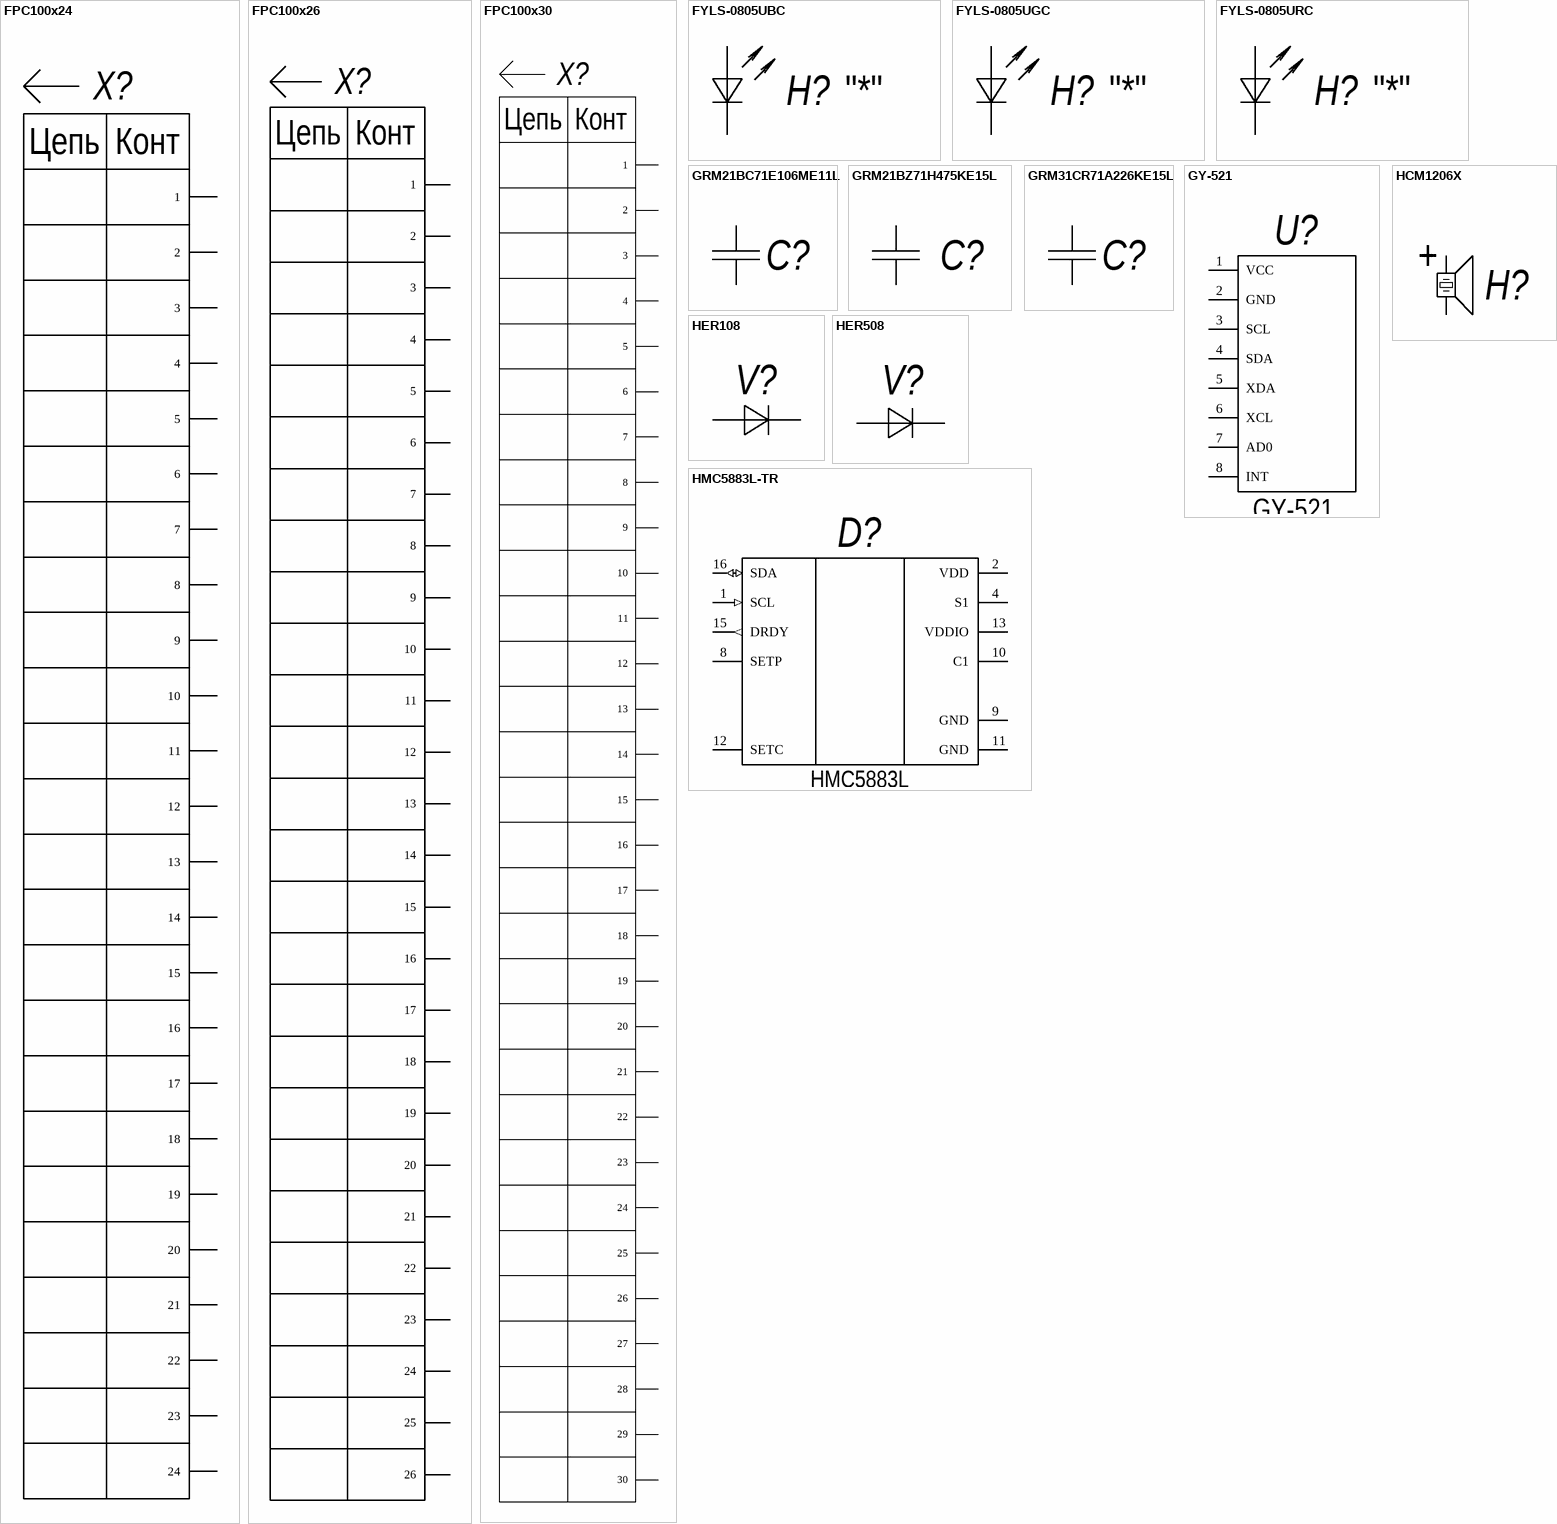
[diagram p13: symbols FPC100x24 to HMC5883L-TR]

## FPC100x24
designator X?  (no BOM)
Value: 0; Case/Package: SMD-24; Mount: SMT; Type: 0
footprint FPС100x24 (1.00mm FPC)
pins: 1, 2, 3, 4, 5, 6, 7, 8, 9, 10, 11, 12, 13, 14, 15, 16, 17, 18, 19, 20, 21, 22, 23, 24
text: Цепь; Конт

## FPC100x26
designator X?  (no BOM)
Value: 0; Case/Package: SMD-26; Mount: SMT; Type: 0
footprint FPС100x26 (1.00mm FPC 26 pin)
pins: 1, 2, 3, 4, 5, 6, 7, 8, 9, 10, 11, 12, 13, 14, 15, 16, 17, 18, 19, 20, 21, 22, 23, 24, 25, 26
text: Цепь; Конт

## FPC100x30
designator X?  (no BOM)
Value: 0; Case/Package: SMD-30; Mount: SMT; Type: 0
footprint FPС100x30 (1.00mm FPC 30 pin)
pins: 1, 2, 3, 4, 5, 6, 7, 8, 9, 10, 11, 12, 13, 14, 15, 16, 17, 18, 19, 20, 21, 22, 23, 24, 25, 26, 27, 28, 29, 30
text: Цепь; Конт

## FYLS-0805UBC
designator H?  Marck-2: "*"  (hidden comment: FYLS-0805UBC)
SMD LED Lamp 0805 Ultra Blue; Value: синий; Marck-1: *; Case/Package: 0805; Mount: SMT; Type: Светодиод
footprint LEDC200X125X110L40N (LED, Chip; 2.00 mm L X 1.25 mm W X 1.10 mm H body)
pins: A, C

## FYLS-0805UGC
designator H?  Marck-2: "*"  (hidden comment: FYLS-0805UGC)
SMD LED Lamp 0805 Pure Green; Value: зелёный; Marck-1: *; Case/Package: 0805; Mount: SMT; Type: Светодиод
footprint LEDC200X125X110L40N (LED, Chip; 2.00 mm L X 1.25 mm W X 1.10 mm H body)
pins: A, C

## FYLS-0805URC
designator H?  Marck-2: "*"  (hidden comment: FYLS-0805URC)
SMD LED Lamp 0805 Pure Red; Value: красный; Marck-1: *; Case/Package: 0805; Mount: SMT; Type: Светодиод
footprint LEDC200X125X110L40N (LED, Chip; 2.00 mm L X 1.25 mm W X 1.10 mm H body)
pins: A, C

## GRM21BC71E106ME11L
designator C?  (value not drawn)
Ceramic capacitor 0805 X7R 10µF 25V; Value: 10u; Voltage Rating (DC): 50V; Type: Конденсатор; Supplier 1: Newark; Supplier Part Number 1: 03AJ1649; Capacitance: 10u; Case/Package: 0805; Case Code (Imperial): 0805; Case Code (Metric): 2012; Dielectric: X7R; Voltage Rating: 50V; Voltage: 50V; Mount: SMT
footprint CAPC200X125X95L50N (Capacitor, Chip; 2.00 mm L X 1.25 mm W X 0.95 mm H body)
pins: 1, 2

## GRM21BZ71H475KE15L
designator C?  (value not drawn)
0805 4.7 nF 50 V ±10 % Tolerance X7R SMT Multilayer Ceramic Capacitor; Manufacturer 1: Murata; Capacitance: 4.7nF; Tolerance: 20%; Voltage Rating (DC): 50V; Value: 4.7n; Type: Конденсатор; RoHS: Yes; Category: Ceramic Capacitors; Stock 2: 5617; Pricing 2: 1=0,14000, 10=0,08800, 50=0,08800, 100=0,03900, 1000=0,02500, 10000=0,02100 (USD); Mount: SMT; Case/Package: 0805; Min Operating Temperature: -55°C; Max Operating Temperature: 125°C; Packaging: Tape and Reel; Dielectric: X7R; Resistor Type: Ceramic; Voltage Rating: 50V; Series: CC; Length: 0.079inch; Width: 0.049inch; Thickness: 0.028inch; Depth: 1.25mm; Lead Free: Lead Free; Halogen Free: Halogen Free; RoHS Compliant: Yes; Case Code (Imperial): 0805; Case Code (Metric): 2012; Voltage: 50V; RoHS 3: Yes; Pricing 3: 16000=0,00882 (USD); Supplier 1: Rs; Supplier Part Number 1: 2478138; Manufacturer Part Number 1: GRM21BZ71H475KE15L; RoHS 1: Yes; Stock 1: 12000; Pricing 1: 10=0,399, 50=0,344, 100=0,277, 1000=0,221 (GBP)
footprint CAPC200X125X95L50N (Capacitor, Chip; 2.00 mm L X 1.25 mm W X 0.95 mm H body)
pins: 1, 2

## GRM31CR71A226KE15L
designator C?  (value not drawn)
Ceramic capacitor 1206 X7R 22µF 10V; Manufacturer 1: Murata; Capacitance: 22uF; Tolerance: 10%; Value: 22u; Type: Конденсатор; Supplier 1: Arrow Electronics; Supplier Part Number 1: GRM31CR71A226KE15L; Manufacturer Part Number 1: GRM31CR71A226KE15L; RoHS: Yes; Category: Ceramic Capacitors; Stock 1: 16303; Pricing 1: 1=0,81930, 10=0,51230, 25=0,48340, 100=0,42480, 250=0,42420, 500=0,35180, 1000=0,34810, 3000=0,30810, 6000=0,24770, 15000=0,23430 (USD); Mount: SMT; Case/Package: 1206; Case Code (Metric): 3216; Case Code (Imperial): 1206; Material: Ceramic; Min Operating Temperature: -55°C; Max Operating Temperature: 125°C; Dielectric: X7R; Packaging: Tape and Reel; Package Quantity: 1; Voltage Rating: 10V; Voltage Rating (DC): 10V; Termination: SMD/SMT; Voltage: 10V; Series: GRM; Construction: Flat; Length: 3.2mm; Width: 0.063inch; Height: 1.6mm; Thickness: 0.071inch; Depth: 1.6mm; Radiation Hardening: No; REACH SVHC: No SVHC; Lead Free: Lead Free; RoHS Compliant: Yes; ComponentLink1URL: https://datasheet.ciiva.com/6072/1747483-6072695.pdf?src-supplier=Farnell; ComponentLink1Description: https://datasheet.ciiva.com/6072/1747483-6072695.pdf?src-supplier=Farnell; ComponentLink2URL: https://datasheet.ciiva.com/11787/0900766b80ef921d-11787760.pdf?src-supplier=RSComponents; ComponentLink2Description: https://datasheet.ciiva.com/11787/0900766b80ef921d-11787760.pdf?src-supplier=RSComponents; ComponentLink3URL: https://datasheet.ciiva.com/3777/1492grm31cr71a226ke1523-3777120.pdf?src-supplier=Arrow+Electronics; ComponentLink3Description: https://datasheet.ciiva.com/3777/1492grm31cr71a226ke1523-3777120.pdf?src-supplier=Arrow+Electronics; ComponentLink4URL: https://datasheet.ciiva.com/29202/451120-da-01-de-vs-chip-kond-1206-22-0-uf-10pr-10-0v-x7r-29202604.pdf?src-supplier=Conrad; ComponentLink4Description: https://datasheet.ciiva.com/29202/451120-da-01-de-vs-chip-kond-1206-22-0-uf-10pr-10-0v-x7r-29202604.pdf?src-supplier=Conrad; ComponentLink5URL: https://datasheet.ciiva.com/29202/451412-da-01-de-vs-kondens-grm31-cr71a-226ke15l-29202268.pdf?src-supplier=Conrad; ComponentLink5Description: https://datasheet.ciiva.com/29202/451412-da-01-de-vs-kondens-grm31-cr71a-226ke15l-29202268.pdf?src-supplier=Conrad; ComponentLink6URL: https://datasheet.ciiva.com/14116/grmseries-highdielectrictype-eng-14116398.pdf?src-supplier=Distrelec; ComponentLink6Description: https://datasheet.ciiva.com/14116/grmseries-highdielectrictype-eng-14116398.pdf?src-supplier=Distrelec; ComponentLink7URL: https://datasheet.ciiva.com/7937/1747483-7937735.pdf?src-supplier=Element14; ComponentLink7Description: https://datasheet.ciiva.com/7937/1747483-7937735.pdf?src-supplier=Element14; ComponentLink8URL: https://datasheet.ciiva.com/142/partnumbering-e-01-142120.pdf?src-supplier=Digi-Key; ComponentLink8Description: https://datasheet.ciiva.com/142/partnumbering-e-01-142120.pdf?src-supplier=Digi-Key; ComponentLink9URL: https://datasheet.ciiva.com/142/partnumbering-e-01-142119.pdf?src-supplier=Digi-Key; ComponentLink9Description: https://datasheet.ciiva.com/142/partnumbering-e-01-142119.pdf?src-supplier=Digi-Key; ComponentLink10URL: https://datasheet.ciiva.com/142/partnumbering-e-01-142121.pdf?src-supplier=Digi-Key; ComponentLink10Description: https://datasheet.ciiva.com/142/partnumbering-e-01-142121.pdf?src-supplier=Digi-Key; ComponentLink11URL: https://datasheet.ciiva.com/48671/product-48671339.pdf?src-supplier=Avnet; ComponentLink11Description: https://datasheet.ciiva.com/48671/product-48671339.pdf?src-supplier=Avnet; ComponentLink12URL: https://datasheet.ciiva.com/16440/product-16440671.pdf?src-supplier=Future+Electronics; ComponentLink12Description: https://datasheet.ciiva.com/16440/product-16440671.pdf?src-supplier=Future+Electronics; ComponentLink13URL: https://datasheet.ciiva.com/2989/product-2989773.pdf?src-supplier=Avnet; ComponentLink13Description: https://datasheet.ciiva.com/2989/product-2989773.pdf?src-supplier=Avnet
footprint CAPC320X160X180L55 (Capacitor, Chip; 3.20 mm L X 1.60 mm W X 1.80 mm H body)
pins: 1, 2

## GY-521
designator U?
Описание свойств компонента; Case/Package: DIP-6 (+MECH-2); Mount: THT; Type: Модуль электронный; Value: GY-521
footprint GY-521 (3 Axis Gyro Accelerometer Sensor Module with Connector)
pins: 1 VCC (power) "Power Supply", 2 GND (power) "Назначение вывода", 3 SCL "Назначение вывода", 4 SDA "Назначение вывода", 5 XDA "Назначение вывода", 6 XCL "Назначение вывода", 7 AD0 "Назначение вывода", 8 INT "Interrupt digital output (totem pole or open-drain)"

## HCM1206X
designator H?  (value not drawn)
Излучатлеь звука; Supplier 1: Newark; Supplier Part Number 1: 25R0863; Case/Package: DIP-2; Mount: THT; Type: Излучатель пьезоэлектрический; Value: HCM1206
footprint HCMRD760W60D1230H980 (Inductor, Polarized, Radial (Inductor); 7.60 mm C X 12.30 mm Dia X 9.80 mm H body)
pins: 1 "Назначение вывода", 2 "Назначение вывода"
text: +

## HER108
designator V?  (value not drawn)
Glass Passivated High Efficient Rectifier 1A 1000V 2-Pin DO-204AL; Manufacturer 1: Taiwan Semiconductor; Manufacturer Part Number 1: HER108G; Max Surge Current: 30A; Reverse Voltage: 1kV; Element Configuration: Single; Recovery Time: 75ns; Max Reverse Current: 5uA; Polarity: Standard; Supplier 1: RSComponents; Supplier Part Number 1: 6881928P; RoHS: Yes; Category: Schottky Diodes; Stock 1: 3800; Pricing 1: 500=0,07700, 1000=0,06800, 2500=0,06500, 5000=0,06400 (GBP); Mount: THT; Case/Package: DO-41; Number of Pins: 2; Min Operating Temperature: -65°C; Max Operating Temperature: 150°C; Package Quantity: 5000; Packaging: Tape and Reel; Max Repetitive Reverse Voltage (Vrrm): 1kV; Reverse Recovery Time: 75ns; Max Forward Surge Current (Ifsm): 30A; Forward Current: 1A; Length: 5.2mm; Width: 2.7mm; Height: 2.7mm; ComponentLink1URL: https://datasheet.ciiva.com/14168/her101g-8g-eng-tds-14168931.pdf?src-supplier=Distrelec; ComponentLink1Description: https://datasheet.ciiva.com/14168/her101g-8g-eng-tds-14168931.pdf?src-supplier=Distrelec; Type: Диод; Value: HER108
footprint DIOAD1000W80L520D270
pins: A, C

## HER508
designator V?  (value not drawn)
High Efficient Rectifier V = 1000 V; Manufacturer 1: Rectron; Manufacturer Part Number 1: HER508B; Max Surge Current: 150A; Recovery Time: 75ns; Max Reverse Current: 10uA; Element Configuration: Single; Reverse Voltage: 1kV; Value: HER508; Supplier 1: Mouser; Supplier Part Number 1: 583-HER508-B; RoHS: No; Category: Rectifier Diodes; Pricing 1: 1=0,97000, 10=0,85400, 50=0,85400, 100=0,65500, 1000=0,41300, 10000=0,34900 (USD); Mount: THT; Case/Package: DO-201AD; Number of Pins: 2; Min Operating Temperature: -65°C; Max Operating Temperature: 150°C; Package Quantity: 500; Packaging: Box; Max Repetitive Reverse Voltage (Vrrm): 1kV; Reverse Recovery Time: 75ns; Peak Non-Repetitive Surge Current: 150A; ComponentLink1URL: https://datasheet.ciiva.com/24352/her501-508-24352047.pdf?src-supplier=Onlinecomponents.com; ComponentLink1Description: https://datasheet.ciiva.com/24352/her501-508-24352047.pdf?src-supplier=Onlinecomponents.com; Type: Диод
footprint DIOAD1750W101L950D530 (Diode, Non-polarized, Axial; 17.50 mm Pitch X 1.015 mm W 9.50 mm L X 5.30 mm Dia. body)
pins: A, C

## HMC5883L-TR
designator D?  value HMC5883L  (hidden comment: HMC5883L-TR)
Magnetoresistive Sensor 3-Axis 16-Pin CLCC T/R; Manufacturer 1: Honeywell; Manufacturer Part Number 1: HMC5883LTR; Interface: I2C; Max Supply Voltage: 3.6V; Min Supply Voltage: 2.16V; Operating Supply Voltage: 2.5V; Operating Supply Current: 100uA; Type: Микросхема; Supplier 1: Bison Technologies; Supplier Part Number 1: HMC5883LTR-90759-HONEYWELL; RoHS 1: Yes; Stock 1: 5000; Case/Package: LCC-16; Number of Pins: 16; Min Operating Temperature: -30°C; Max Operating Temperature: 85°C; Packaging: Tape and Reel; Package Quantity: 1; Series: HMC; Radiation Hardening: No; Reach SVHC Compliant: Yes; ComponentLink1URL: https://datasheet.ciiva.com/1314/1683374-1314148.pdf?src-supplier=Element14; ComponentLink1Description: https://datasheet.ciiva.com/1314/1683374-1314148.pdf?src-supplier=Element14; ComponentLink2URL: https://datasheet.ciiva.com/2816/hmc5883l-3-axis-digital-compass-ic-2816453.pdf?src-supplier=Digi-Key; ComponentLink2Description: https://datasheet.ciiva.com/2816/hmc5883l-3-axis-digital-compass-ic-2816453.pdf?src-supplier=Digi-Key; ComponentLink3URL: https://datasheet.ciiva.com/2816/hmc5883l-3-axis-digital-compass-ic-2816454.pdf?src-supplier=Digi-Key; ComponentLink3Description: https://datasheet.ciiva.com/2816/hmc5883l-3-axis-digital-compass-ic-2816454.pdf?src-supplier=Digi-Key; ComponentLink4URL: https://datasheet.ciiva.com/2816/hmc5883l-3-axis-digital-compass-ic-2816455.pdf?src-supplier=Digi-Key; ComponentLink4Description: https://datasheet.ciiva.com/2816/hmc5883l-3-axis-digital-compass-ic-2816455.pdf?src-supplier=Digi-Key; ComponentLink5URL: https://datasheet.ciiva.com/15205/getdatasheetpartid-355413-15205917.pdf?src-supplier=Verical; ComponentLink5Description: https://datasheet.ciiva.com/15205/getdatasheetpartid-355413-15205917.pdf?src-supplier=Verical; Mount: SMT
footprint Honywell_QFN16P50_300X300X90L32X24 (Quad Flat No-Lead (QFN), 0.50 mm pitch;  square, 4 pin X 4 pin, 3.00 mm L X 3.00 mm W X 0.90 mm H body)
pins: 1 SCL (in) "Serial Clock", 2 VDD (power) "Power Supply", 3 NC hidden "Not to be Connected", 4 S1 (power) "Tie to VDDIO", 5 NC hidden "Not to be Connected", 6 NC hidden "Not to be Connected", 7 NC hidden "Not to be Connected", 8 SETP "S/R Capacitor (C2) Connection", 9 GND (power) "Supply Ground", 10 C1 "Reservoir Capacitor (C1) Connection", 11 GND (power) "Supply Ground", 12 SETC "S/R Capacitor (C2) Connection – Driver Side", 13 VDDIO (power) "IO Power Supply (1.71V to VDD)", 14 NC hidden "Not to be Connected", 15 DRDY (out) "Data Ready, Interrupt Pin", 16 SDA (io) "Serial Data – I2C Master/Slave Data"

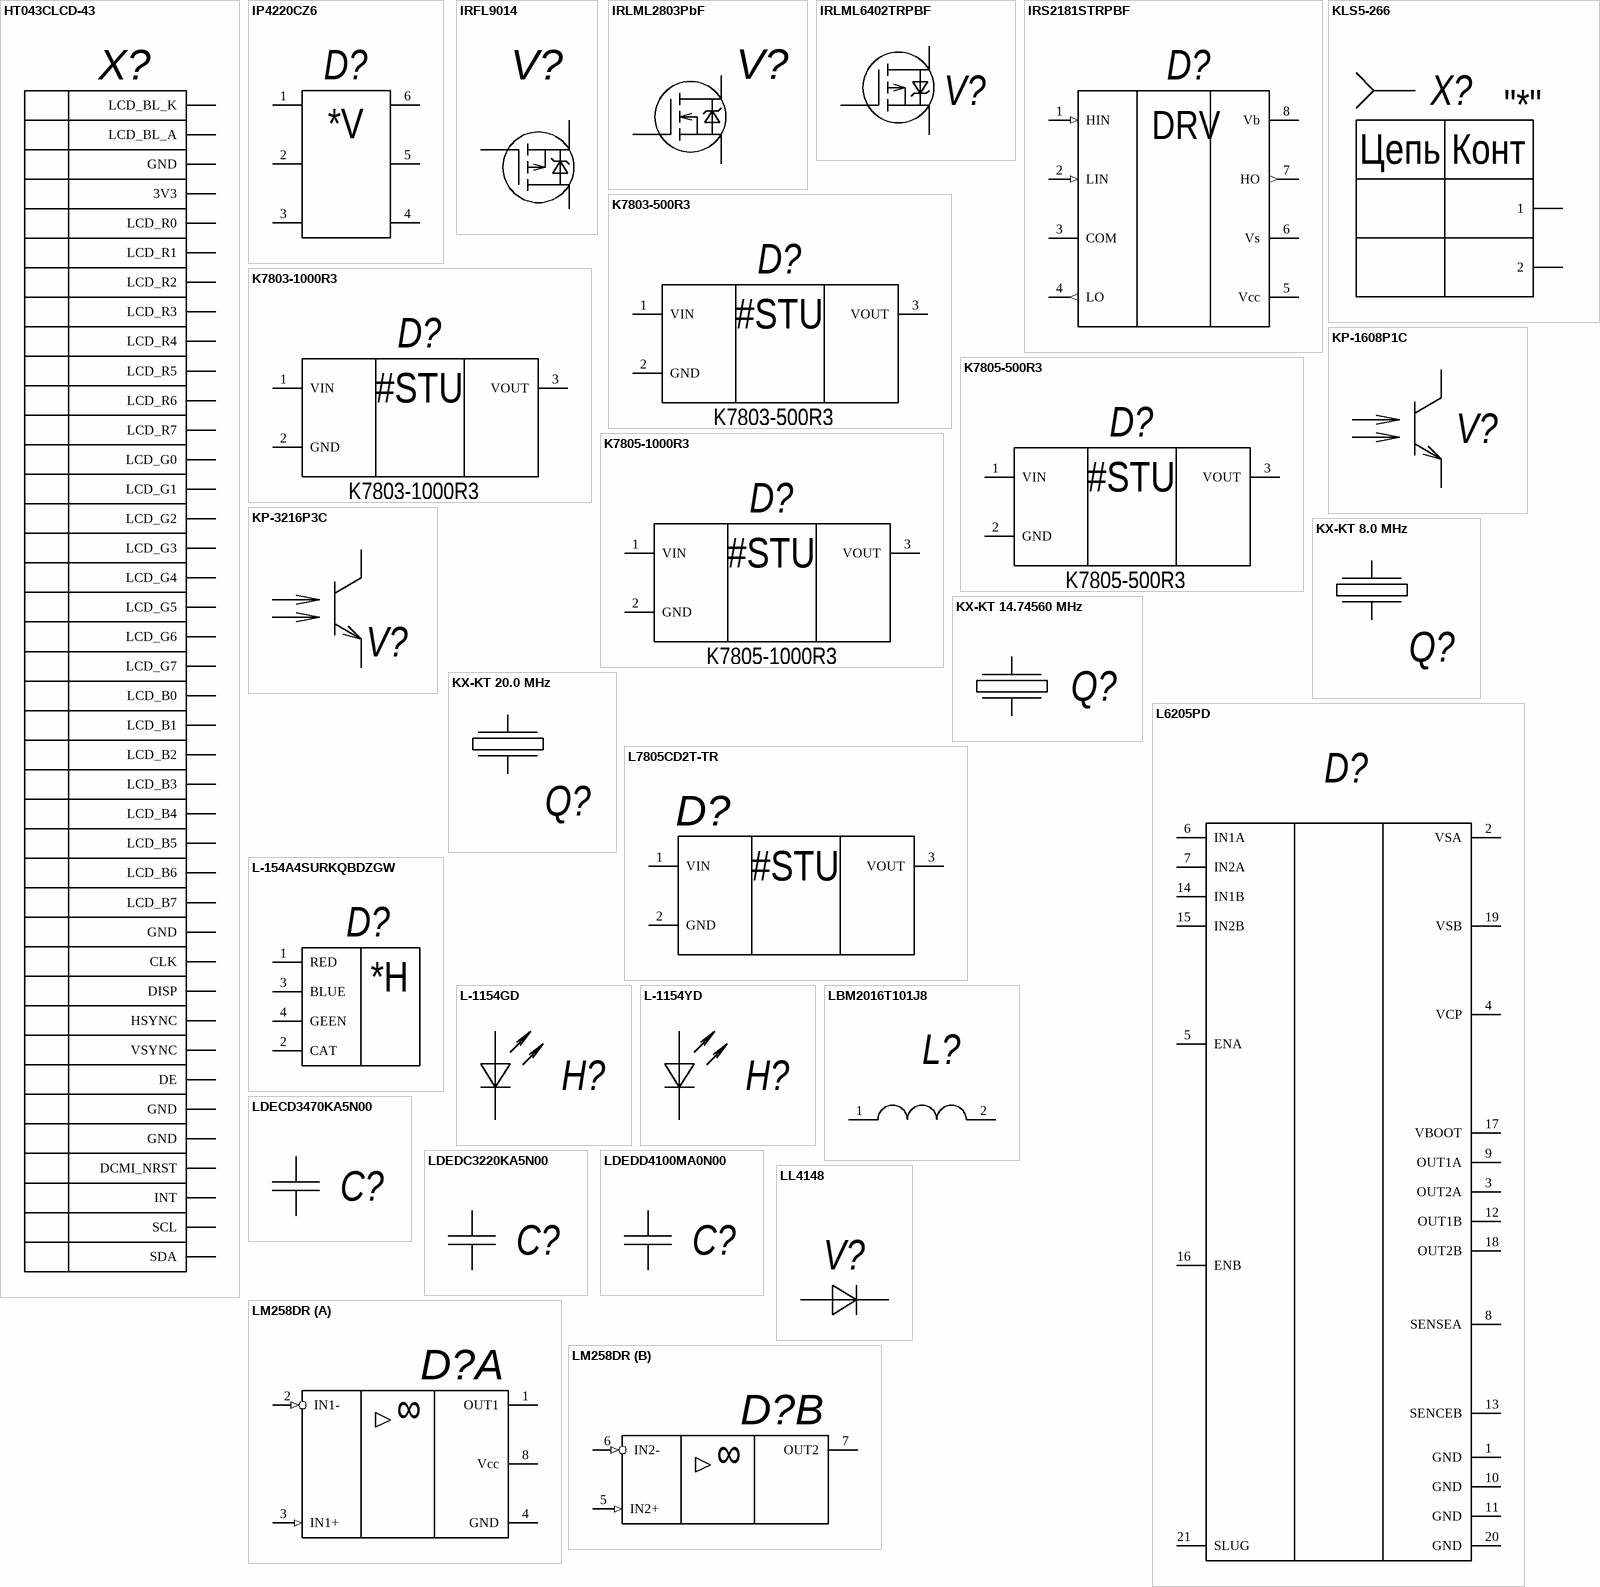
[diagram p14: symbols HT043CLCD-43 to LM258DR]

## HT043CLCD-43
designator X?, comment HT043C  (value not drawn)
4.3 inch TFT 480*272 pixels with LED Backlight and Capacitive touch panel, high luminance; Value: 0; Case/Package: SMD-40; Mount: SMT; Type: 0
footprint FPС080x40 (0.8 mm FPC 40 pin)
pins: 1 LCD_BL_K "Назначение вывода", 2 LCD_BL_A "Назначение вывода", 3 GND "Назначение вывода", 4 3V3 "Назначение вывода", 5 LCD_R0 "Назначение вывода", 6 LCD_R1 "Назначение вывода", 7 LCD_R2 "Назначение вывода", 8 LCD_R3 "Назначение вывода", 9 LCD_R4 "Назначение вывода", 10 LCD_R5 "Назначение вывода", 11 LCD_R6 "Назначение вывода", 12 LCD_R7 "Назначение вывода", 13 LCD_G0 "Назначение вывода", 14 LCD_G1 "Назначение вывода", 15 LCD_G2 "Назначение вывода", 16 LCD_G3 "Назначение вывода", 17 LCD_G4 "Назначение вывода", 18 LCD_G5 "Назначение вывода", 19 LCD_G6 "Назначение вывода", 20 LCD_G7 "Назначение вывода", 21 LCD_B0 "Назначение вывода", 22 LCD_B1 "Назначение вывода", 23 LCD_B2 "Назначение вывода", 24 LCD_B3 "Назначение вывода", 25 LCD_B4 "Назначение вывода", 26 LCD_B5 "Назначение вывода", 27 LCD_B6 "Назначение вывода", 28 LCD_B7 "Назначение вывода", 29 GND "Назначение вывода", 30 CLK "Назначение вывода", 31 DISP "Назначение вывода", 32 HSYNC "Назначение вывода", 33 VSYNC "Назначение вывода", 34 DE "Назначение вывода", 35 GND "Назначение вывода", 36 GND "Назначение вывода", 37 DCMI_NRST "Назначение вывода", 38 INT "Назначение вывода", 39 SCL "Назначение вывода", 40 SDA "Назначение вывода"